# Altium integrated library LIB1.IntLib: 106 symbols (part 1 of 3)
Pins are listed as number, name and electrical type; pins without a type are passive.

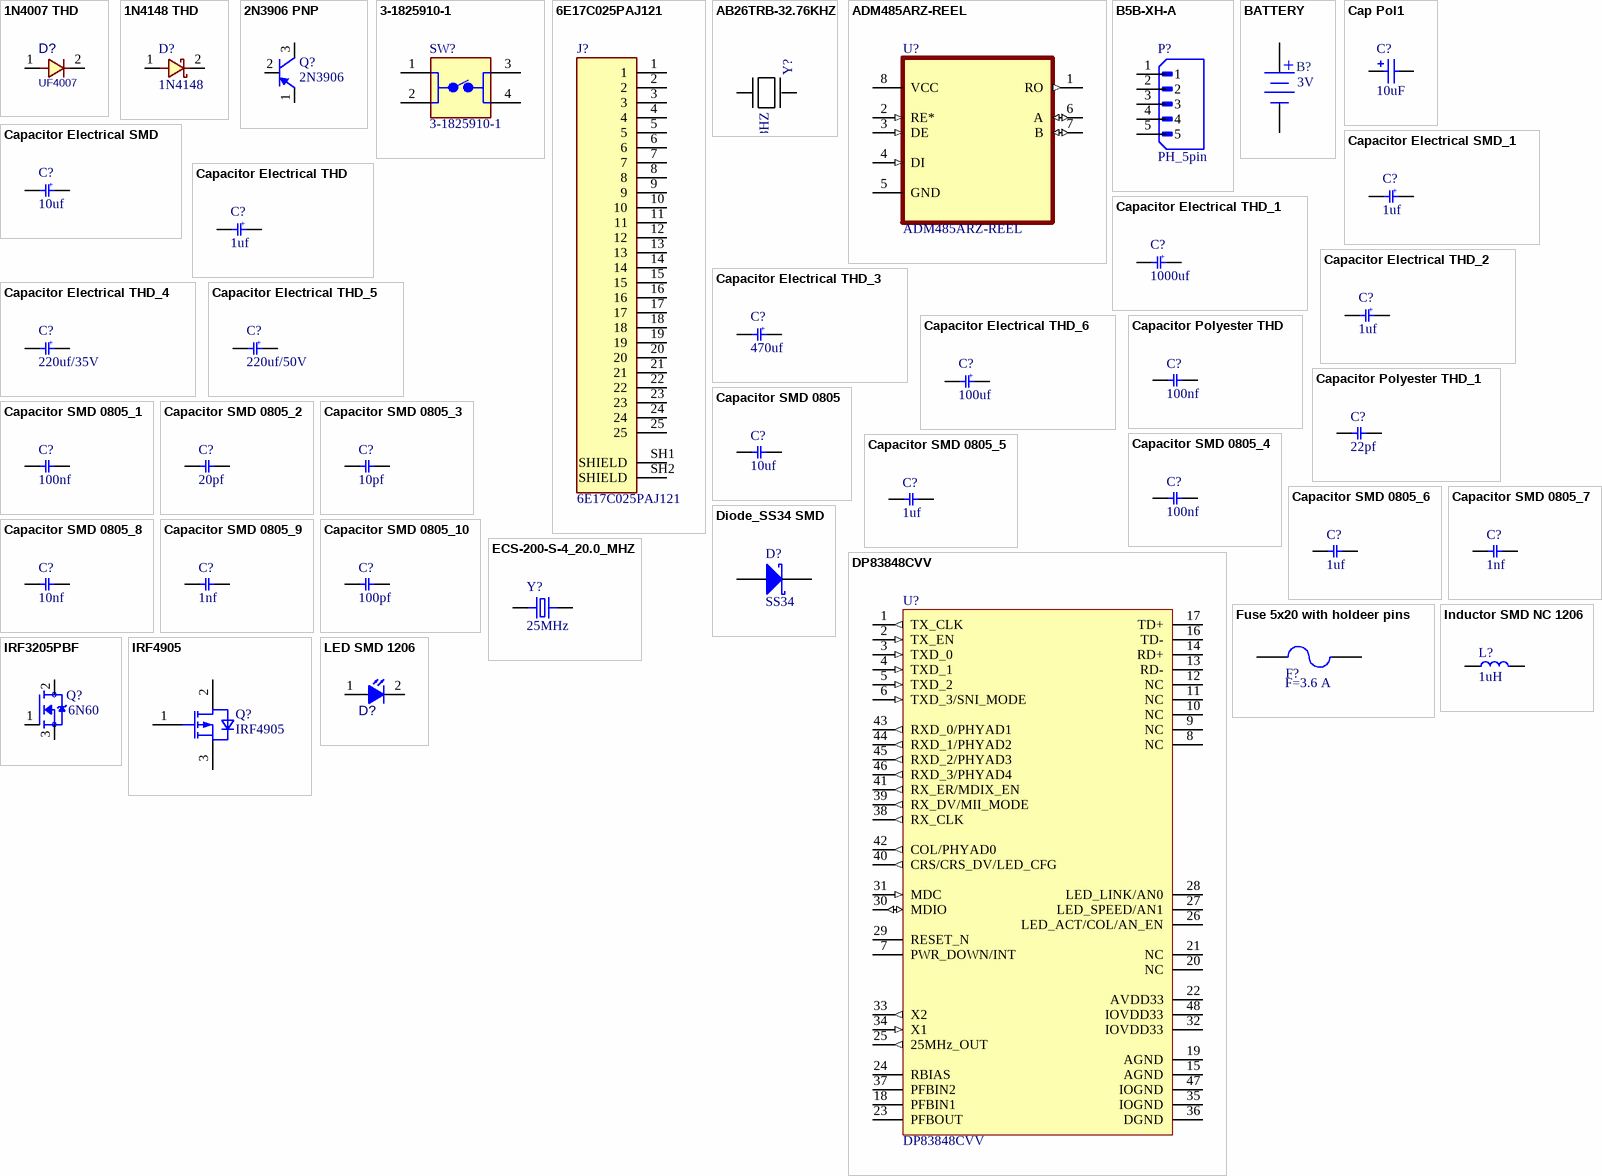
[diagram p0: symbols 1N4007 THD to LED SMD 1206]

## 1N4007 THD
designator D?  value UF4007  (hidden comment: 1N4007 THD)
DIODE, GENERAL PURPOSE, 1000V/1A; DatasheetVersion: 2022; ComponentLink1Description: Tarahiboard; ComponentLink1URL: https://www.tarahiboard.com/product/library-pack
footprint D_AX04_DO41 (DIODE 0.4 INCH SPACING DO-41 (Make www.tarahiboard.com))
footprint D_AX03_1WS (DIODE 0.3 INCH SPACING 1W STAND (Make www.tarahiboard.com))
footprint Diode (Diode, Axial; Body 5.2 x 2.7 mm (LxDia. max), Lead Dia. 0.86 mm (max) (Make www.tarahiboard.com))
footprint Diode-1n4001 ((Make www.tarahiboard.com))
pins: 1, 2

## 1N4148 THD
designator D?  value 1N4148  (hidden comment: 1N4148 THD)
High Conductance Fast Diode; DatasheetVersion: 2022; ComponentLink1Description: Tarahiboard; ComponentLink1URL: https://www.tarahiboard.com/product/library-pack
footprint Diode 1W ((Make www.tarahiboard.com))
footprint Diode 1W_Stand ((Make www.tarahiboard.com))
footprint D_AX02_DO35 (DIODE 0.2 INCH SPACING DO-35, 1N4148 (Make www.tarahiboard.com))
footprint DO-35- (Diode, Axial; Body 3.8 x 1.9 mm (LxDia. max), Lead Dia. 0.53 mm (max) (Make www.tarahiboard.com))
pins: 1, 2

## 2N3906 PNP
designator Q?  value 2N3906  (hidden comment: 2N3906 PNP)
ComponentLink1Description: Tarahiboard; ComponentLink1URL: https://www.tarahiboard.com/product/library-pack; DatasheetVersion: 2022
footprint SOT23_BEC_L (SOT23, 3-Leads, Body 2.9x1.3mm, Pitch 0.95mm, Lead Span 2.4mm, IPC High Density (Make www.tarahiboard.com)); pin to pad 1>2 2>1
footprint TO92 STR ((Make www.tarahiboard.com))
pins: 1 E, 2 B, 3 C

## 3-1825910-1
designator SW?
Switch Push Button OFF (ON) SPST Round Button 0.05A 24VDC Momentary Contact PC Pins Thru-Hole; MF: TE Connectivity; SnapEDA_Link: https://www.snapeda.com/parts/3-1825910-1/TE+Connectivity+ALCOSWITCH+Switches/view-part/?ref=snap; Package: None; Value: *; MP: 3-1825910-1; Check_prices: https://www.snapeda.com/parts/3-1825910-1/TE+Connectivity+ALCOSWITCH+Switches/view-part/?ref=eda
footprint TE_3-1825910-1
pins: 1, 2, 3, 4

## 6E17C025PAJ121
designator J?
Conn D-Subminiature PIN 25 POS 2.76mm Solder RA Thru-Hole 25 Terminal 1 Port; MF: Amphenol; Availability: Warning; Value: *; Package: None; SnapEDA_Link: https://www.snapeda.com/parts/6E17C025PAJ121/Amphenol/view-part/4791916/?ref=snap; Price: None; Check_prices: https://www.snapeda.com/parts/6E17C025PAJ121/Amphenol/view-part/4791916/?ref=eda; MP: 6E17C025PAJ121
footprint CONN_6E17C025PAJ121
pins: 1, 2, 3, 4, 5, 6, 7, 8, 9, 10, 11, 12, 13, 14, 15, 16, 17, 18, 19, 20, 21, 22, 23, 24, 25, SH1 SHIELD, SH2 SHIELD

## AB26TRB-32.76KHZ
designator Y?, comment 32.768HZ
SnapEDA_Link: https://www.snapeda.com/parts/AB26TRB-32.76KHZ/Abracon/view-part/?ref=snap; Check_prices: https://www.snapeda.com/parts/AB26TRB-32.76KHZ/Abracon/view-part/?ref=eda; Value: *
footprint *XTAL_AB26TRB-32.76KHZ
pins: 1, 2

## ADM485ARZ-REEL
designator U?
5 V, Low Power, 5 Mbps, Half Duplex EIA RS-485 Transceiver; MF: Analog Devices; SnapEDA_Link: https://www.snapeda.com/parts/ADM485ARZ/Analog+Devices/view-part/?ref=snap; Package: SOIC-8 Analog Devices; Value: *; MP: ADM485ARZ; Check_prices: https://www.snapeda.com/parts/ADM485ARZ/Analog+Devices/view-part/?ref=eda
footprint SOIC127P600X175-8N
pins: 1 RO (out), 2 RE* (in), 3 DE (in), 4 DI (in), 5 GND, 6 A (io), 7 B (io), 8 VCC (power)

## B5B-XH-A
designator P?, comment PH_5pin
Connector Header Through Hole 5 position 0.098 (2.50mm); MF: JST Sales; MP: B5B-XH-A; SnapEDA_Link: https://www.snapeda.com/parts/B5B-XH-A/JST+Sales+America+Inc./view-part/?ref=snap; Package: None; Value: *; Check_prices: https://www.snapeda.com/parts/B5B-XH-A/JST+Sales+America+Inc./view-part/?ref=eda
footprint JST_B5B-XH-A
pins: 1, 2, 3, 4, 5

## BATTERY
designator B?  value 3V  (hidden comment: BATTERY)
DatasheetVersion: 2022; ComponentLink1Description: Tarahiboard; ComponentLink1URL: https://www.tarahiboard.com/product/library-pack
footprint CELL HOLDER2 (Battery Cell Holder (Make www.tarahiboard.com))
footprint SMD CELL HOLDER ((Make www.tarahiboard.com))
footprint BAT Backup ((Make www.tarahiboard.com))
footprint WA BCMC Battery 1 (Battery Holder, Battery  (www.tarahiboard.com))
footprint WA-BCMC Battery 2 (Battery Holder, Battery (www.tarahiboard.com))
footprint WA-BCMC Battery 3 (Battery Holder, Battery (www.tarahiboard.com))
footprint WA-BCMC Battery 4 (Battery Holder, Battery (www.tarahiboard.com))
footprint WA BCPH 1 (Battery Holder (Make www.tarahiboard.com))
footprint WA BCPH 2 (Battery Holder (Make www.tarahiboard.com))
footprint WA BCPH 3 (Battery Holder (Make www.tarahiboard.com))
footprint WA BCPH 4 (Battery Holder (Make www.tarahiboard.com))
footprint Holder & Battery (Holder Battery 3.3v (Make www.tarahiboard.com))
footprint BATTERY REDD (CELL BATTERY HOLDER 1220 12mm CR1220(Make www.tarahiboard.com))
footprint WA BCPH 2 (Battery Holder (Make www.tarahiboard.com))
pins: 1 + (power), 2 - (power)
1 alternate drawing of the same symbol

## Cap Pol1
designator C?, comment 10uF
Polarized Capacitor (Radial); Published: 8-Jun-2000; Revision: July-2002: Re-released for DXP Platform.; Publisher: Altium Limited; Value: 10uF
simulation model CAP (Capacitor)
signal-integrity model C200M
footprint 3528 (Footprint not found)
footprint TAN-B
footprint cap10
pins: 1, 2

## Capacitor Electrical SMD
designator C?  value 10uf  (hidden comment: Capacitor Electrical SMD)
DatasheetVersion: 2022; ComponentLink1Description: Tarahiboard; ComponentLink1URL: https://www.tarahiboard.com
footprint Elko A ((Make www.tarahiboard.com))
footprint Elko B ((Make www.tarahiboard.com))
footprint Elko C ((Make www.tarahiboard.com))
footprint Elko D ((Make www.tarahiboard.com))
footprint Elko D8 ((Make www.tarahiboard.com))
footprint Elko E ((Make www.tarahiboard.com))
footprint Elko F ((Make www.tarahiboard.com))
footprint Elko G ((Make www.tarahiboard.com))
footprint C_EL_10_9 (Electrolytic Cap, 10.3mm, L: 8.7mm)
footprint C_EL_10_10 (Electrolytic Cap, 10.3mm, L: 10mm)
footprint C_EL_10_12 (Electrolytic Cap, 10.3mm, L: 12.4mm)
footprint C_EL_12 (Electrolytic Cap, 12.5x13mm)
footprint C_EL_6_4 (Electrolytic Cap, D: 6.3mm L: 3.9mm, Size D (Make www.tarahiboard.com))
footprint C_EL_6_6 (Electrolytic Cap, D: 6.3mm L: 5.8mm, Size D (Make www.tarahiboard.com))
footprint C_EL_6_8 (Electrolytic Cap, D: 6.3mm L: 7.7mm, Size D (Make www.tarahiboard.com))
footprint C_EL_8 (Electrolytic Cap, Size E, Size F, 8.3X10 (Make www.tarahiboard.com))
footprint C_EL_4_4 (Electrolytic Cap, D: 4.3mm, Size B, 3.9mm Height)
footprint C_EL_4_5 (Electrolytic Cap, D: 4.3mm, Size B, 5.5mm Height)
footprint C0805 (CHIP Capacitor, 2.0X1.3mm, 0805 (Make www.tarahiboard.com))
pins: 1, 2
text: +

## Capacitor Electrical SMD_1
designator C?, comment value 1uf  (hidden comment: Capacitor Electrical SMD)
DatasheetVersion: 2022; ComponentLink1Description: Tarahiboard; ComponentLink1URL: https://www.tarahiboard.com
footprint Elko A ((Make www.tarahiboard.com))
footprint Elko B ((Make www.tarahiboard.com))
footprint Elko C ((Make www.tarahiboard.com))
footprint Elko D ((Make www.tarahiboard.com))
footprint Elko D8 ((Make www.tarahiboard.com))
footprint Elko E ((Make www.tarahiboard.com))
footprint Elko F ((Make www.tarahiboard.com))
footprint Elko G ((Make www.tarahiboard.com))
footprint C_EL_10_9 (Electrolytic Cap, 10.3mm, L: 8.7mm)
footprint C_EL_10_10 (Electrolytic Cap, 10.3mm, L: 10mm)
footprint C_EL_10_12 (Electrolytic Cap, 10.3mm, L: 12.4mm)
footprint C_EL_12 (Electrolytic Cap, 12.5x13mm)
footprint C_EL_6_4 (Electrolytic Cap, D: 6.3mm L: 3.9mm, Size D (Make www.tarahiboard.com))
footprint C_EL_6_6 (Electrolytic Cap, D: 6.3mm L: 5.8mm, Size D (Make www.tarahiboard.com))
footprint C_EL_6_8 (Electrolytic Cap, D: 6.3mm L: 7.7mm, Size D (Make www.tarahiboard.com))
footprint C_EL_8 (Electrolytic Cap, Size E, Size F, 8.3X10 (Make www.tarahiboard.com))
footprint C_EL_4_4 (Electrolytic Cap, D: 4.3mm, Size B, 3.9mm Height)
footprint C0805 (CHIP Capacitor, 2.0X1.3mm, 0805 (Make www.tarahiboard.com))
footprint C_EL_5 (Electrolytic Cap, D: 5.0mm, L: 5.8mm, Size C)
pins: 1, 2
text: +

## Capacitor Electrical THD
designator C?  value 1uf  (hidden comment: Capacitor Electrical THD)
DatasheetVersion: 20222; ComponentLink1Description: Tarahiboard; ComponentLink1URL: https://www.tarahiboard.com
footprint 1500uF 35V 13x40 ((Make www.tarahiboard.com))
footprint Cap electrolitic radial 8x12-3.5 (Cap electrolitic radial 8x12-3.5 (Make www.tarahiboard.com))
footprint Cap electrolitic radial 10x16-5 (Cap electrolitic radial 10x16-5 (Make www.tarahiboard.com))
footprint Cap electrolitic radial 13x25-5 (Cap electrolitic radial 13x25-5 (Make www.tarahiboard.com))
footprint CAPCITOR ((Make www.tarahiboard.com))
footprint Cap_1_(1.5mm) (Capacitor, Electrolytic, Radial; Body 5 x 6.8 mm (Dia.xH typ); Pin Spacing 2 mm (typ) (Make www.tarahiboard.com))
footprint Cap_2_(2.5mm) (Capacitor, Electrolytic, Radial; Body 6.3 x 6.8 mm (Dia.xH typ); Pin Spacing 2.5 mm (typ)  (Make www.tarahiboard.com))
footprint Cap_3_(3.5mm) (Capacitor, Electrolytic, Radial; Body 8 x 5 mm (Dia.xH typ); Pin Spacing 3.5 mm (typ) (Make www.tarahiboard.com))
footprint Cap_4_(5mm) (Capacitor, Electrolytic, Radial; Body 10 x 5 mm (Dia.xH typ); Pin Spacing 5 mm (typ) (Make www.tarahiboard.com))
footprint Cap1_(2mm) (Capacitor, Electrolytic, Radial; Body 5 x 6.8 mm (Dia.xH typ); Pin Spacing 2 mm (typ) (Make www.tarahiboard.com))
footprint Cap2_(2.5mm) (Capacitor, Electrolytic, Radial; Body 6.3 x 6.8 mm (Dia.xH typ); Pin Spacing 2.5 mm (typ) (Make www.tarahiboard.com))
footprint Cap3_(3.5mm) (Capacitor, Electrolytic, Radial; Body 8 x 5 mm (Dia.xH typ); Pin Spacing 3.5 mm (typ) (Make www.tarahiboard.com))
footprint Cap4_(5mm) (Capacitor, Electrolytic, Radial; Body 10 x 5 mm (Dia.xH typ); Pin Spacing 5 mm (typ) (Make www.tarahiboard.com))
footprint Cap5_(7.5mm) (Capacitor, Electrolytic, Radial; Body 16 x 25 mm (Dia.xH typ); Pin Spacing 7.5 mm (typ) (Make www.tarahiboard.com))
footprint C_EL_4X7 (Cap Elec, D4.0X7.0H pitch: 1.5mm (Make www.tarahiboard.com))
footprint C_EL_5X7 (Cap Elec, D5.0X7.0H pitch: 2mm (Make www.tarahiboard.com))
footprint C_EL_5X11 (Cap Elec, D5.0X11.0H pitch: 2mm (Make www.tarahiboard.com))
footprint C_EL_6X11 (Cap Elec, D6.3X11.0H pitch: 2.5mm (Make www.tarahiboard.com))
footprint C_EL_6X12_R (Cap Elec, D6.3X12.0H pitch: 2.5mm (Make www.tarahiboard.com))
footprint C_EL_8X12 (Cap Elec, D8.0X12.0H pitch: 3.5mm, RB.14/.26, RB.15/.32 (Make www.tarahiboard.com))
footprint C_EL_8X12R (Cap Elec, D8.0X12.0H pitch: 3.5mm, RIGHT ANGLE (Make www.tarahiboard.com))
footprint C_EL_10X12 (Cap Elec, D10.0X12.0H pitch: 5.0mm (Make www.tarahiboard.com))
footprint C_EL_10X20 (Cap Elec, D10.0X20.0H pitch: 5.0mm, RB.2/.4 (Make www.tarahiboard.com))
footprint C_EL_12X25 (Cap Elec, D12.0X25.0H pitch: 5.0mm, RB.2/.5 (Make www.tarahiboard.com))
footprint C_EL_16X25 (Cap Elec, D16.0X25.0H pitch: 7.6mm, RB.3/.6 (Make www.tarahiboard.com))
footprint C_EL_18X35 (Cap Elec, D18.0X35.0H pitch: 7.6mm, RB.3/.7 (Make www.tarahiboard.com))
footprint C_EL_20X35 (Cap Elec, D20.0X35.0H pitch: 10.0mm, RB.4/.8 (Make www.tarahiboard.com))
footprint C_EL_25X40 (Cap Elec, D25.0X40.0H pitch: 12.8mm, RB.5/1 (Make www.tarahiboard.com))
footprint C_EL_26X13X27 (Cap Elec, 26X13X27mm, 18mm pitch (Make www.tarahiboard.com))
footprint C_EL_30X50 (Cap Elec, D30.0X50.0H pitch: 10.0mm (Make www.tarahiboard.com))
footprint C_EL_35X30 (Cap Elec, D35.0X30.0H pitch: 10.0mm, 470uF/400V, RB.44/1.3  (Make www.tarahiboard.com))
footprint PLOAR 30x22.2 ((Make www.tarahiboard.com))
footprint ploar 8x12 size ((Make www.tarahiboard.com))
footprint POLAR 10X20 SIZE ((Make www.tarahiboard.com))
footprint POLAR 16X32 SIZE ((Make www.tarahiboard.com))
pins: 1, 2
text: +

## Capacitor Electrical THD_1
designator C?, comment value 1000uf  (hidden comment: Capacitor Electrical THD)
DatasheetVersion: 20222; ComponentLink1Description: Tarahiboard; ComponentLink1URL: https://www.tarahiboard.com
footprint 1500uF 35V 13x40 ((Make www.tarahiboard.com))
footprint Cap electrolitic radial 8x12-3.5 (Cap electrolitic radial 8x12-3.5 (Make www.tarahiboard.com))
footprint Cap electrolitic radial 10x16-5 (Cap electrolitic radial 10x16-5 (Make www.tarahiboard.com))
footprint Cap electrolitic radial 13x25-5 (Cap electrolitic radial 13x25-5 (Make www.tarahiboard.com))
footprint CAPCITOR ((Make www.tarahiboard.com))
footprint Cap_1_(1.5mm) (Capacitor, Electrolytic, Radial; Body 5 x 6.8 mm (Dia.xH typ); Pin Spacing 2 mm (typ) (Make www.tarahiboard.com))
footprint Cap_2_(2.5mm) (Capacitor, Electrolytic, Radial; Body 6.3 x 6.8 mm (Dia.xH typ); Pin Spacing 2.5 mm (typ)  (Make www.tarahiboard.com))
footprint Cap_3_(3.5mm) (Capacitor, Electrolytic, Radial; Body 8 x 5 mm (Dia.xH typ); Pin Spacing 3.5 mm (typ) (Make www.tarahiboard.com))
footprint Cap_4_(5mm) (Capacitor, Electrolytic, Radial; Body 10 x 5 mm (Dia.xH typ); Pin Spacing 5 mm (typ) (Make www.tarahiboard.com))
footprint Cap1_(2mm) (Capacitor, Electrolytic, Radial; Body 5 x 6.8 mm (Dia.xH typ); Pin Spacing 2 mm (typ) (Make www.tarahiboard.com))
footprint Cap2_(2.5mm) (Capacitor, Electrolytic, Radial; Body 6.3 x 6.8 mm (Dia.xH typ); Pin Spacing 2.5 mm (typ) (Make www.tarahiboard.com))
footprint Cap3_(3.5mm) (Capacitor, Electrolytic, Radial; Body 8 x 5 mm (Dia.xH typ); Pin Spacing 3.5 mm (typ) (Make www.tarahiboard.com))
footprint Cap4_(5mm) (Capacitor, Electrolytic, Radial; Body 10 x 5 mm (Dia.xH typ); Pin Spacing 5 mm (typ) (Make www.tarahiboard.com))
footprint Cap5_(7.5mm) (Capacitor, Electrolytic, Radial; Body 16 x 25 mm (Dia.xH typ); Pin Spacing 7.5 mm (typ) (Make www.tarahiboard.com))
footprint C_EL_4X7 (Cap Elec, D4.0X7.0H pitch: 1.5mm (Make www.tarahiboard.com))
footprint C_EL_5X7 (Cap Elec, D5.0X7.0H pitch: 2mm (Make www.tarahiboard.com))
footprint C_EL_5X11 (Cap Elec, D5.0X11.0H pitch: 2mm (Make www.tarahiboard.com))
footprint C_EL_6X11 (Cap Elec, D6.3X11.0H pitch: 2.5mm (Make www.tarahiboard.com))
footprint C_EL_6X12_R (Cap Elec, D6.3X12.0H pitch: 2.5mm (Make www.tarahiboard.com))
footprint C_EL_8X12 (Cap Elec, D8.0X12.0H pitch: 3.5mm, RB.14/.26, RB.15/.32 (Make www.tarahiboard.com))
footprint C_EL_8X12R (Cap Elec, D8.0X12.0H pitch: 3.5mm, RIGHT ANGLE (Make www.tarahiboard.com))
footprint C_EL_10X12 (Cap Elec, D10.0X12.0H pitch: 5.0mm (Make www.tarahiboard.com))
footprint C_EL_10X20 (Cap Elec, D10.0X20.0H pitch: 5.0mm, RB.2/.4 (Make www.tarahiboard.com))
footprint C_EL_12X25 (Cap Elec, D12.0X25.0H pitch: 5.0mm, RB.2/.5 (Make www.tarahiboard.com))
footprint C_EL_16X25 (Cap Elec, D16.0X25.0H pitch: 7.6mm, RB.3/.6 (Make www.tarahiboard.com))
footprint C_EL_18X35 (Cap Elec, D18.0X35.0H pitch: 7.6mm, RB.3/.7 (Make www.tarahiboard.com))
footprint C_EL_20X35 (Cap Elec, D20.0X35.0H pitch: 10.0mm, RB.4/.8 (Make www.tarahiboard.com))
footprint C_EL_25X40 (Cap Elec, D25.0X40.0H pitch: 12.8mm, RB.5/1 (Make www.tarahiboard.com))
footprint C_EL_26X13X27 (Cap Elec, 26X13X27mm, 18mm pitch (Make www.tarahiboard.com))
footprint C_EL_30X50 (Cap Elec, D30.0X50.0H pitch: 10.0mm (Make www.tarahiboard.com))
footprint C_EL_35X30 (Cap Elec, D35.0X30.0H pitch: 10.0mm, 470uF/400V, RB.44/1.3  (Make www.tarahiboard.com))
footprint PLOAR 30x22.2 ((Make www.tarahiboard.com))
footprint ploar 8x12 size ((Make www.tarahiboard.com))
footprint POLAR 10X20 SIZE ((Make www.tarahiboard.com))
footprint POLAR 16X32 SIZE ((Make www.tarahiboard.com))
pins: 1, 2
text: +

## Capacitor Electrical THD_2
designator C?, comment value 1uf  (hidden comment: Capacitor Electrical THD)
DatasheetVersion: 20222; ComponentLink1Description: Tarahiboard; ComponentLink1URL: https://www.tarahiboard.com
footprint 1500uF 35V 13x40 ((Make www.tarahiboard.com))
footprint Cap electrolitic radial 8x12-3.5 (Cap electrolitic radial 8x12-3.5 (Make www.tarahiboard.com))
footprint Cap electrolitic radial 10x16-5 (Cap electrolitic radial 10x16-5 (Make www.tarahiboard.com))
footprint Cap electrolitic radial 13x25-5 (Cap electrolitic radial 13x25-5 (Make www.tarahiboard.com))
footprint CAPCITOR ((Make www.tarahiboard.com))
footprint Cap_1_(1.5mm) (Capacitor, Electrolytic, Radial; Body 5 x 6.8 mm (Dia.xH typ); Pin Spacing 2 mm (typ) (Make www.tarahiboard.com))
footprint Cap_2_(2.5mm) (Capacitor, Electrolytic, Radial; Body 6.3 x 6.8 mm (Dia.xH typ); Pin Spacing 2.5 mm (typ)  (Make www.tarahiboard.com))
footprint Cap_3_(3.5mm) (Capacitor, Electrolytic, Radial; Body 8 x 5 mm (Dia.xH typ); Pin Spacing 3.5 mm (typ) (Make www.tarahiboard.com))
footprint Cap_4_(5mm) (Capacitor, Electrolytic, Radial; Body 10 x 5 mm (Dia.xH typ); Pin Spacing 5 mm (typ) (Make www.tarahiboard.com))
footprint Cap1_(2mm) (Capacitor, Electrolytic, Radial; Body 5 x 6.8 mm (Dia.xH typ); Pin Spacing 2 mm (typ) (Make www.tarahiboard.com))
footprint Cap2_(2.5mm) (Capacitor, Electrolytic, Radial; Body 6.3 x 6.8 mm (Dia.xH typ); Pin Spacing 2.5 mm (typ) (Make www.tarahiboard.com))
footprint Cap3_(3.5mm) (Capacitor, Electrolytic, Radial; Body 8 x 5 mm (Dia.xH typ); Pin Spacing 3.5 mm (typ) (Make www.tarahiboard.com))
footprint Cap4_(5mm) (Capacitor, Electrolytic, Radial; Body 10 x 5 mm (Dia.xH typ); Pin Spacing 5 mm (typ) (Make www.tarahiboard.com))
footprint Cap5_(7.5mm) (Capacitor, Electrolytic, Radial; Body 16 x 25 mm (Dia.xH typ); Pin Spacing 7.5 mm (typ) (Make www.tarahiboard.com))
footprint C_EL_4X7 (Cap Elec, D4.0X7.0H pitch: 1.5mm (Make www.tarahiboard.com))
footprint C_EL_5X7 (Cap Elec, D5.0X7.0H pitch: 2mm (Make www.tarahiboard.com))
footprint C_EL_5X11 (Cap Elec, D5.0X11.0H pitch: 2mm (Make www.tarahiboard.com))
footprint C_EL_6X11 (Cap Elec, D6.3X11.0H pitch: 2.5mm (Make www.tarahiboard.com))
footprint C_EL_6X12_R (Cap Elec, D6.3X12.0H pitch: 2.5mm (Make www.tarahiboard.com))
footprint C_EL_8X12 (Cap Elec, D8.0X12.0H pitch: 3.5mm, RB.14/.26, RB.15/.32 (Make www.tarahiboard.com))
footprint C_EL_8X12R (Cap Elec, D8.0X12.0H pitch: 3.5mm, RIGHT ANGLE (Make www.tarahiboard.com))
footprint C_EL_10X12 (Cap Elec, D10.0X12.0H pitch: 5.0mm (Make www.tarahiboard.com))
footprint C_EL_10X20 (Cap Elec, D10.0X20.0H pitch: 5.0mm, RB.2/.4 (Make www.tarahiboard.com))
footprint C_EL_12X25 (Cap Elec, D12.0X25.0H pitch: 5.0mm, RB.2/.5 (Make www.tarahiboard.com))
footprint C_EL_16X25 (Cap Elec, D16.0X25.0H pitch: 7.6mm, RB.3/.6 (Make www.tarahiboard.com))
footprint C_EL_18X35 (Cap Elec, D18.0X35.0H pitch: 7.6mm, RB.3/.7 (Make www.tarahiboard.com))
footprint C_EL_20X35 (Cap Elec, D20.0X35.0H pitch: 10.0mm, RB.4/.8 (Make www.tarahiboard.com))
footprint C_EL_25X40 (Cap Elec, D25.0X40.0H pitch: 12.8mm, RB.5/1 (Make www.tarahiboard.com))
footprint C_EL_26X13X27 (Cap Elec, 26X13X27mm, 18mm pitch (Make www.tarahiboard.com))
footprint C_EL_30X50 (Cap Elec, D30.0X50.0H pitch: 10.0mm (Make www.tarahiboard.com))
footprint C_EL_35X30 (Cap Elec, D35.0X30.0H pitch: 10.0mm, 470uF/400V, RB.44/1.3  (Make www.tarahiboard.com))
footprint PLOAR 30x22.2 ((Make www.tarahiboard.com))
footprint ploar 8x12 size ((Make www.tarahiboard.com))
footprint POLAR 10X20 SIZE ((Make www.tarahiboard.com))
footprint POLAR 16X32 SIZE ((Make www.tarahiboard.com))
pins: 1, 2
text: +

## Capacitor Electrical THD_3
designator C?, comment value 470uf  (hidden comment: Capacitor Electrical THD)
DatasheetVersion: 20222; ComponentLink1Description: Tarahiboard; ComponentLink1URL: https://www.tarahiboard.com
footprint 1500uF 35V 13x40 ((Make www.tarahiboard.com))
footprint Cap electrolitic radial 8x12-3.5 (Cap electrolitic radial 8x12-3.5 (Make www.tarahiboard.com))
footprint Cap electrolitic radial 10x16-5 (Cap electrolitic radial 10x16-5 (Make www.tarahiboard.com))
footprint Cap electrolitic radial 13x25-5 (Cap electrolitic radial 13x25-5 (Make www.tarahiboard.com))
footprint CAPCITOR ((Make www.tarahiboard.com))
footprint Cap_1_(1.5mm) (Capacitor, Electrolytic, Radial; Body 5 x 6.8 mm (Dia.xH typ); Pin Spacing 2 mm (typ) (Make www.tarahiboard.com))
footprint Cap_2_(2.5mm) (Capacitor, Electrolytic, Radial; Body 6.3 x 6.8 mm (Dia.xH typ); Pin Spacing 2.5 mm (typ)  (Make www.tarahiboard.com))
footprint Cap_3_(3.5mm) (Capacitor, Electrolytic, Radial; Body 8 x 5 mm (Dia.xH typ); Pin Spacing 3.5 mm (typ) (Make www.tarahiboard.com))
footprint Cap_4_(5mm) (Capacitor, Electrolytic, Radial; Body 10 x 5 mm (Dia.xH typ); Pin Spacing 5 mm (typ) (Make www.tarahiboard.com))
footprint Cap1_(2mm) (Capacitor, Electrolytic, Radial; Body 5 x 6.8 mm (Dia.xH typ); Pin Spacing 2 mm (typ) (Make www.tarahiboard.com))
footprint Cap2_(2.5mm) (Capacitor, Electrolytic, Radial; Body 6.3 x 6.8 mm (Dia.xH typ); Pin Spacing 2.5 mm (typ) (Make www.tarahiboard.com))
footprint Cap3_(3.5mm) (Capacitor, Electrolytic, Radial; Body 8 x 5 mm (Dia.xH typ); Pin Spacing 3.5 mm (typ) (Make www.tarahiboard.com))
footprint Cap4_(5mm) (Capacitor, Electrolytic, Radial; Body 10 x 5 mm (Dia.xH typ); Pin Spacing 5 mm (typ) (Make www.tarahiboard.com))
footprint Cap5_(7.5mm) (Capacitor, Electrolytic, Radial; Body 16 x 25 mm (Dia.xH typ); Pin Spacing 7.5 mm (typ) (Make www.tarahiboard.com))
footprint C_EL_4X7 (Cap Elec, D4.0X7.0H pitch: 1.5mm (Make www.tarahiboard.com))
footprint C_EL_5X7 (Cap Elec, D5.0X7.0H pitch: 2mm (Make www.tarahiboard.com))
footprint C_EL_5X11 (Cap Elec, D5.0X11.0H pitch: 2mm (Make www.tarahiboard.com))
footprint C_EL_6X11 (Cap Elec, D6.3X11.0H pitch: 2.5mm (Make www.tarahiboard.com))
footprint C_EL_6X12_R (Cap Elec, D6.3X12.0H pitch: 2.5mm (Make www.tarahiboard.com))
footprint C_EL_8X12 (Cap Elec, D8.0X12.0H pitch: 3.5mm, RB.14/.26, RB.15/.32 (Make www.tarahiboard.com))
footprint C_EL_8X12R (Cap Elec, D8.0X12.0H pitch: 3.5mm, RIGHT ANGLE (Make www.tarahiboard.com))
footprint C_EL_10X12 (Cap Elec, D10.0X12.0H pitch: 5.0mm (Make www.tarahiboard.com))
footprint C_EL_10X20 (Cap Elec, D10.0X20.0H pitch: 5.0mm, RB.2/.4 (Make www.tarahiboard.com))
footprint C_EL_12X25 (Cap Elec, D12.0X25.0H pitch: 5.0mm, RB.2/.5 (Make www.tarahiboard.com))
footprint C_EL_16X25 (Cap Elec, D16.0X25.0H pitch: 7.6mm, RB.3/.6 (Make www.tarahiboard.com))
footprint C_EL_18X35 (Cap Elec, D18.0X35.0H pitch: 7.6mm, RB.3/.7 (Make www.tarahiboard.com))
footprint C_EL_20X35 (Cap Elec, D20.0X35.0H pitch: 10.0mm, RB.4/.8 (Make www.tarahiboard.com))
footprint C_EL_25X40 (Cap Elec, D25.0X40.0H pitch: 12.8mm, RB.5/1 (Make www.tarahiboard.com))
footprint C_EL_26X13X27 (Cap Elec, 26X13X27mm, 18mm pitch (Make www.tarahiboard.com))
footprint C_EL_30X50 (Cap Elec, D30.0X50.0H pitch: 10.0mm (Make www.tarahiboard.com))
footprint C_EL_35X30 (Cap Elec, D35.0X30.0H pitch: 10.0mm, 470uF/400V, RB.44/1.3  (Make www.tarahiboard.com))
footprint PLOAR 30x22.2 ((Make www.tarahiboard.com))
footprint ploar 8x12 size ((Make www.tarahiboard.com))
footprint POLAR 10X20 SIZE ((Make www.tarahiboard.com))
footprint POLAR 16X32 SIZE ((Make www.tarahiboard.com))
pins: 1, 2
text: +

## Capacitor Electrical THD_4
designator C?, comment value 220uf/35V  (hidden comment: Capacitor Electrical THD)
DatasheetVersion: 20222; ComponentLink1Description: Tarahiboard; ComponentLink1URL: https://www.tarahiboard.com
footprint 1500uF 35V 13x40 ((Make www.tarahiboard.com))
footprint Cap electrolitic radial 8x12-3.5 (Cap electrolitic radial 8x12-3.5 (Make www.tarahiboard.com))
footprint Cap electrolitic radial 10x16-5 (Cap electrolitic radial 10x16-5 (Make www.tarahiboard.com))
footprint Cap electrolitic radial 13x25-5 (Cap electrolitic radial 13x25-5 (Make www.tarahiboard.com))
footprint CAPCITOR ((Make www.tarahiboard.com))
footprint Cap_1_(1.5mm) (Capacitor, Electrolytic, Radial; Body 5 x 6.8 mm (Dia.xH typ); Pin Spacing 2 mm (typ) (Make www.tarahiboard.com))
footprint Cap_2_(2.5mm) (Capacitor, Electrolytic, Radial; Body 6.3 x 6.8 mm (Dia.xH typ); Pin Spacing 2.5 mm (typ)  (Make www.tarahiboard.com))
footprint Cap_3_(3.5mm) (Capacitor, Electrolytic, Radial; Body 8 x 5 mm (Dia.xH typ); Pin Spacing 3.5 mm (typ) (Make www.tarahiboard.com))
footprint Cap_4_(5mm) (Capacitor, Electrolytic, Radial; Body 10 x 5 mm (Dia.xH typ); Pin Spacing 5 mm (typ) (Make www.tarahiboard.com))
footprint Cap1_(2mm) (Capacitor, Electrolytic, Radial; Body 5 x 6.8 mm (Dia.xH typ); Pin Spacing 2 mm (typ) (Make www.tarahiboard.com))
footprint Cap2_(2.5mm) (Capacitor, Electrolytic, Radial; Body 6.3 x 6.8 mm (Dia.xH typ); Pin Spacing 2.5 mm (typ) (Make www.tarahiboard.com))
footprint Cap3_(3.5mm) (Capacitor, Electrolytic, Radial; Body 8 x 5 mm (Dia.xH typ); Pin Spacing 3.5 mm (typ) (Make www.tarahiboard.com))
footprint Cap4_(5mm) (Capacitor, Electrolytic, Radial; Body 10 x 5 mm (Dia.xH typ); Pin Spacing 5 mm (typ) (Make www.tarahiboard.com))
footprint Cap5_(7.5mm) (Capacitor, Electrolytic, Radial; Body 16 x 25 mm (Dia.xH typ); Pin Spacing 7.5 mm (typ) (Make www.tarahiboard.com))
footprint C_EL_4X7 (Cap Elec, D4.0X7.0H pitch: 1.5mm (Make www.tarahiboard.com))
footprint C_EL_5X7 (Cap Elec, D5.0X7.0H pitch: 2mm (Make www.tarahiboard.com))
footprint C_EL_5X11 (Cap Elec, D5.0X11.0H pitch: 2mm (Make www.tarahiboard.com))
footprint C_EL_6X11 (Cap Elec, D6.3X11.0H pitch: 2.5mm (Make www.tarahiboard.com))
footprint C_EL_6X12_R (Cap Elec, D6.3X12.0H pitch: 2.5mm (Make www.tarahiboard.com))
footprint C_EL_8X12 (Cap Elec, D8.0X12.0H pitch: 3.5mm, RB.14/.26, RB.15/.32 (Make www.tarahiboard.com))
footprint C_EL_8X12R (Cap Elec, D8.0X12.0H pitch: 3.5mm, RIGHT ANGLE (Make www.tarahiboard.com))
footprint C_EL_10X12 (Cap Elec, D10.0X12.0H pitch: 5.0mm (Make www.tarahiboard.com))
footprint C_EL_10X20 (Cap Elec, D10.0X20.0H pitch: 5.0mm, RB.2/.4 (Make www.tarahiboard.com))
footprint C_EL_12X25 (Cap Elec, D12.0X25.0H pitch: 5.0mm, RB.2/.5 (Make www.tarahiboard.com))
footprint C_EL_16X25 (Cap Elec, D16.0X25.0H pitch: 7.6mm, RB.3/.6 (Make www.tarahiboard.com))
footprint C_EL_18X35 (Cap Elec, D18.0X35.0H pitch: 7.6mm, RB.3/.7 (Make www.tarahiboard.com))
footprint C_EL_20X35 (Cap Elec, D20.0X35.0H pitch: 10.0mm, RB.4/.8 (Make www.tarahiboard.com))
footprint C_EL_25X40 (Cap Elec, D25.0X40.0H pitch: 12.8mm, RB.5/1 (Make www.tarahiboard.com))
footprint C_EL_26X13X27 (Cap Elec, 26X13X27mm, 18mm pitch (Make www.tarahiboard.com))
footprint C_EL_30X50 (Cap Elec, D30.0X50.0H pitch: 10.0mm (Make www.tarahiboard.com))
footprint C_EL_35X30 (Cap Elec, D35.0X30.0H pitch: 10.0mm, 470uF/400V, RB.44/1.3  (Make www.tarahiboard.com))
footprint PLOAR 30x22.2 ((Make www.tarahiboard.com))
footprint ploar 8x12 size ((Make www.tarahiboard.com))
footprint POLAR 10X20 SIZE ((Make www.tarahiboard.com))
footprint POLAR 16X32 SIZE ((Make www.tarahiboard.com))
pins: 1, 2
text: +

## Capacitor Electrical THD_5
designator C?, comment value 220uf/50V  (hidden comment: Capacitor Electrical THD)
DatasheetVersion: 20222; ComponentLink1Description: Tarahiboard; ComponentLink1URL: https://www.tarahiboard.com
footprint 1500uF 35V 13x40 ((Make www.tarahiboard.com))
footprint Cap electrolitic radial 8x12-3.5 (Cap electrolitic radial 8x12-3.5 (Make www.tarahiboard.com))
footprint Cap electrolitic radial 10x16-5 (Cap electrolitic radial 10x16-5 (Make www.tarahiboard.com))
footprint Cap electrolitic radial 13x25-5 (Cap electrolitic radial 13x25-5 (Make www.tarahiboard.com))
footprint CAPCITOR ((Make www.tarahiboard.com))
footprint Cap_1_(1.5mm) (Capacitor, Electrolytic, Radial; Body 5 x 6.8 mm (Dia.xH typ); Pin Spacing 2 mm (typ) (Make www.tarahiboard.com))
footprint Cap_2_(2.5mm) (Capacitor, Electrolytic, Radial; Body 6.3 x 6.8 mm (Dia.xH typ); Pin Spacing 2.5 mm (typ)  (Make www.tarahiboard.com))
footprint Cap_3_(3.5mm) (Capacitor, Electrolytic, Radial; Body 8 x 5 mm (Dia.xH typ); Pin Spacing 3.5 mm (typ) (Make www.tarahiboard.com))
footprint Cap_4_(5mm) (Capacitor, Electrolytic, Radial; Body 10 x 5 mm (Dia.xH typ); Pin Spacing 5 mm (typ) (Make www.tarahiboard.com))
footprint Cap1_(2mm) (Capacitor, Electrolytic, Radial; Body 5 x 6.8 mm (Dia.xH typ); Pin Spacing 2 mm (typ) (Make www.tarahiboard.com))
footprint Cap2_(2.5mm) (Capacitor, Electrolytic, Radial; Body 6.3 x 6.8 mm (Dia.xH typ); Pin Spacing 2.5 mm (typ) (Make www.tarahiboard.com))
footprint Cap3_(3.5mm) (Capacitor, Electrolytic, Radial; Body 8 x 5 mm (Dia.xH typ); Pin Spacing 3.5 mm (typ) (Make www.tarahiboard.com))
footprint Cap4_(5mm) (Capacitor, Electrolytic, Radial; Body 10 x 5 mm (Dia.xH typ); Pin Spacing 5 mm (typ) (Make www.tarahiboard.com))
footprint Cap5_(7.5mm) (Capacitor, Electrolytic, Radial; Body 16 x 25 mm (Dia.xH typ); Pin Spacing 7.5 mm (typ) (Make www.tarahiboard.com))
footprint C_EL_4X7 (Cap Elec, D4.0X7.0H pitch: 1.5mm (Make www.tarahiboard.com))
footprint C_EL_5X7 (Cap Elec, D5.0X7.0H pitch: 2mm (Make www.tarahiboard.com))
footprint C_EL_5X11 (Cap Elec, D5.0X11.0H pitch: 2mm (Make www.tarahiboard.com))
footprint C_EL_6X11 (Cap Elec, D6.3X11.0H pitch: 2.5mm (Make www.tarahiboard.com))
footprint C_EL_6X12_R (Cap Elec, D6.3X12.0H pitch: 2.5mm (Make www.tarahiboard.com))
footprint C_EL_8X12 (Cap Elec, D8.0X12.0H pitch: 3.5mm, RB.14/.26, RB.15/.32 (Make www.tarahiboard.com))
footprint C_EL_8X12R (Cap Elec, D8.0X12.0H pitch: 3.5mm, RIGHT ANGLE (Make www.tarahiboard.com))
footprint C_EL_10X12 (Cap Elec, D10.0X12.0H pitch: 5.0mm (Make www.tarahiboard.com))
footprint C_EL_10X20 (Cap Elec, D10.0X20.0H pitch: 5.0mm, RB.2/.4 (Make www.tarahiboard.com))
footprint C_EL_12X25 (Cap Elec, D12.0X25.0H pitch: 5.0mm, RB.2/.5 (Make www.tarahiboard.com))
footprint C_EL_16X25 (Cap Elec, D16.0X25.0H pitch: 7.6mm, RB.3/.6 (Make www.tarahiboard.com))
footprint C_EL_18X35 (Cap Elec, D18.0X35.0H pitch: 7.6mm, RB.3/.7 (Make www.tarahiboard.com))
footprint C_EL_20X35 (Cap Elec, D20.0X35.0H pitch: 10.0mm, RB.4/.8 (Make www.tarahiboard.com))
footprint C_EL_25X40 (Cap Elec, D25.0X40.0H pitch: 12.8mm, RB.5/1 (Make www.tarahiboard.com))
footprint C_EL_26X13X27 (Cap Elec, 26X13X27mm, 18mm pitch (Make www.tarahiboard.com))
footprint C_EL_30X50 (Cap Elec, D30.0X50.0H pitch: 10.0mm (Make www.tarahiboard.com))
footprint C_EL_35X30 (Cap Elec, D35.0X30.0H pitch: 10.0mm, 470uF/400V, RB.44/1.3  (Make www.tarahiboard.com))
footprint PLOAR 30x22.2 ((Make www.tarahiboard.com))
footprint ploar 8x12 size ((Make www.tarahiboard.com))
footprint POLAR 10X20 SIZE ((Make www.tarahiboard.com))
footprint POLAR 16X32 SIZE ((Make www.tarahiboard.com))
pins: 1, 2
text: +

## Capacitor Electrical THD_6
designator C?, comment value 100uf  (hidden comment: Capacitor Electrical THD)
DatasheetVersion: 20222; ComponentLink1Description: Tarahiboard; ComponentLink1URL: https://www.tarahiboard.com
footprint 1500uF 35V 13x40 ((Make www.tarahiboard.com))
footprint Cap electrolitic radial 8x12-3.5 (Cap electrolitic radial 8x12-3.5 (Make www.tarahiboard.com))
footprint Cap electrolitic radial 10x16-5 (Cap electrolitic radial 10x16-5 (Make www.tarahiboard.com))
footprint Cap electrolitic radial 13x25-5 (Cap electrolitic radial 13x25-5 (Make www.tarahiboard.com))
footprint CAPCITOR ((Make www.tarahiboard.com))
footprint Cap_1_(1.5mm) (Capacitor, Electrolytic, Radial; Body 5 x 6.8 mm (Dia.xH typ); Pin Spacing 2 mm (typ) (Make www.tarahiboard.com))
footprint Cap_2_(2.5mm) (Capacitor, Electrolytic, Radial; Body 6.3 x 6.8 mm (Dia.xH typ); Pin Spacing 2.5 mm (typ)  (Make www.tarahiboard.com))
footprint Cap_3_(3.5mm) (Capacitor, Electrolytic, Radial; Body 8 x 5 mm (Dia.xH typ); Pin Spacing 3.5 mm (typ) (Make www.tarahiboard.com))
footprint Cap_4_(5mm) (Capacitor, Electrolytic, Radial; Body 10 x 5 mm (Dia.xH typ); Pin Spacing 5 mm (typ) (Make www.tarahiboard.com))
footprint Cap1_(2mm) (Capacitor, Electrolytic, Radial; Body 5 x 6.8 mm (Dia.xH typ); Pin Spacing 2 mm (typ) (Make www.tarahiboard.com))
footprint Cap2_(2.5mm) (Capacitor, Electrolytic, Radial; Body 6.3 x 6.8 mm (Dia.xH typ); Pin Spacing 2.5 mm (typ) (Make www.tarahiboard.com))
footprint Cap3_(3.5mm) (Capacitor, Electrolytic, Radial; Body 8 x 5 mm (Dia.xH typ); Pin Spacing 3.5 mm (typ) (Make www.tarahiboard.com))
footprint Cap4_(5mm) (Capacitor, Electrolytic, Radial; Body 10 x 5 mm (Dia.xH typ); Pin Spacing 5 mm (typ) (Make www.tarahiboard.com))
footprint Cap5_(7.5mm) (Capacitor, Electrolytic, Radial; Body 16 x 25 mm (Dia.xH typ); Pin Spacing 7.5 mm (typ) (Make www.tarahiboard.com))
footprint C_EL_4X7 (Cap Elec, D4.0X7.0H pitch: 1.5mm (Make www.tarahiboard.com))
footprint C_EL_5X7 (Cap Elec, D5.0X7.0H pitch: 2mm (Make www.tarahiboard.com))
footprint C_EL_5X11 (Cap Elec, D5.0X11.0H pitch: 2mm (Make www.tarahiboard.com))
footprint C_EL_6X11 (Cap Elec, D6.3X11.0H pitch: 2.5mm (Make www.tarahiboard.com))
footprint C_EL_6X12_R (Cap Elec, D6.3X12.0H pitch: 2.5mm (Make www.tarahiboard.com))
footprint C_EL_8X12 (Cap Elec, D8.0X12.0H pitch: 3.5mm, RB.14/.26, RB.15/.32 (Make www.tarahiboard.com))
footprint C_EL_8X12R (Cap Elec, D8.0X12.0H pitch: 3.5mm, RIGHT ANGLE (Make www.tarahiboard.com))
footprint C_EL_10X12 (Cap Elec, D10.0X12.0H pitch: 5.0mm (Make www.tarahiboard.com))
footprint C_EL_10X20 (Cap Elec, D10.0X20.0H pitch: 5.0mm, RB.2/.4 (Make www.tarahiboard.com))
footprint C_EL_12X25 (Cap Elec, D12.0X25.0H pitch: 5.0mm, RB.2/.5 (Make www.tarahiboard.com))
footprint C_EL_16X25 (Cap Elec, D16.0X25.0H pitch: 7.6mm, RB.3/.6 (Make www.tarahiboard.com))
footprint C_EL_18X35 (Cap Elec, D18.0X35.0H pitch: 7.6mm, RB.3/.7 (Make www.tarahiboard.com))
footprint C_EL_20X35 (Cap Elec, D20.0X35.0H pitch: 10.0mm, RB.4/.8 (Make www.tarahiboard.com))
footprint C_EL_25X40 (Cap Elec, D25.0X40.0H pitch: 12.8mm, RB.5/1 (Make www.tarahiboard.com))
footprint C_EL_26X13X27 (Cap Elec, 26X13X27mm, 18mm pitch (Make www.tarahiboard.com))
footprint C_EL_30X50 (Cap Elec, D30.0X50.0H pitch: 10.0mm (Make www.tarahiboard.com))
footprint C_EL_35X30 (Cap Elec, D35.0X30.0H pitch: 10.0mm, 470uF/400V, RB.44/1.3  (Make www.tarahiboard.com))
footprint PLOAR 30x22.2 ((Make www.tarahiboard.com))
footprint ploar 8x12 size ((Make www.tarahiboard.com))
footprint POLAR 10X20 SIZE ((Make www.tarahiboard.com))
footprint POLAR 16X32 SIZE ((Make www.tarahiboard.com))
pins: 1, 2
text: +

## Capacitor Polyester THD
designator C?  value 100nf  (hidden comment: Capacitor Polyester THD)
DatasheetVersion: 2022; ComponentLink1Description: Tarahiboard; ComponentLink1URL: https://www.tarahiboard.com
footprint Cap - 10nF - 630V ((Make www.tarahiboard.com))
footprint Cap - 100nF - 2 ((www.smartw.ir))
footprint Cap - 100nF - 400V ((www.smartw.ir))
footprint Cap - 220n - 400V - Poly ((Make www.tarahiboard.com))
footprint Cap - 330nF - 400V ((Make www.tarahiboard.com))
footprint Cap_680nF ((Make www.tarahiboard.com))
footprint C_PLY_6X2_5 (CAP, FILM MKT, 6.3X2.4mm, pitch: 4.7mm (Make www.tarahiboard.com))
footprint C_PLY_6X3 (CAP, POLYESTER, 5.8X3.5mm pitch: 5.0mm (Make www.tarahiboard.com))
footprint C_PLY_7X3 (CAP, POLYESTER, 7.5X3mm pitch: 5.0mm(Make www.tarahiboard.com))
footprint C_PLY_7X5 (CAP, POLYESTER, 7.0X5.0mm pitch: 5.0mm (Make www.tarahiboard.com))
footprint C_PLY_7X5X10 (CAP, POLYESTER, 7.0X5.0x10mm pitch: 5.0mm (Make www.tarahiboard.com))
footprint C_PLY_7X6 (CAP, POLYESTER, 7.0X6.0mm pitch: 5.0mm (Make www.tarahiboard.com))
footprint C_PLY_7X6_5 (CAP, POLYESTER, 7.3X6.5mm pitch: 5.0mm (Make www.tarahiboard.com))
footprint C_PLY_9X6 (CAP, POLYESTER, 9.3X5.2mm pitch: 7.6mm (Make www.tarahiboard.com))
footprint C_PLY_10X5 (CAP, POLYESTER, 10X5.5mm pitch: 7.6mm (Make www.tarahiboard.com))
footprint C_PLY_10X6X9 (CAP, POLYESTER, 10.5X6.0X9.0mm pitch: 7.6mm (Make www.tarahiboard.com))
footprint C_PLY_10X6X12 (CAP, POLYESTER, 10.3X6.0X12.0mm pitch: 7.6mm(Make www.tarahiboard.com))
footprint C_PLY_10X8 (CAP, POLYESTER, 10.0X8.0 pitch: 7.6mm (Make www.tarahiboard.com))
footprint C_PLY_12X4 (CAP, POLYESTER, 12.5X4.5X9.0 pitch: 10mm (Make www.tarahiboard.com))
footprint C_PLY_13X5 (CAP, POLYESTER, 12.8X4.8 pitch: 10mm(Make www.tarahiboard.com))
footprint C_PLY_19X8 (CAP, POLYESTER, 19.0X8.0mm pitch: 15.0mm, 0.22uF 400V (Make www.tarahiboard.com))
footprint C_PLY_22X7 (CAP, POLYESTER, 33.0X7.0mm pitch: 20.0mm, 0.68uF 400V  (Make www.tarahiboard.com))
footprint C_PLY_24X6 (CAP, POLYESTER, 23.8X5.8mm pitch: 20.0mm, 0.33uF 400V (Make www.tarahiboard.com))
footprint C_PLY_26X8 (CAP, POLYESTER, 26.0X7.8mm pitch: 20.0mm, 0.68uF 400V (Make www.tarahiboard.com))
footprint C_PLY_26X9 (CAP, POLYESTER, 26.0X9.3mm pitch: 20.0mm, 0.68uF 400V (Make www.tarahiboard.com))
pins: 1, 2

## Capacitor Polyester THD_1
designator C?, comment value 22pf  (hidden comment: Capacitor Polyester THD)
DatasheetVersion: 2022; ComponentLink1Description: Tarahiboard; ComponentLink1URL: https://www.tarahiboard.com
footprint Cap - 10nF - 630V ((Make www.tarahiboard.com))
footprint Cap - 100nF - 2 ((www.smartw.ir))
footprint Cap - 100nF - 400V ((www.smartw.ir))
footprint Cap - 220n - 400V - Poly ((Make www.tarahiboard.com))
footprint Cap - 330nF - 400V ((Make www.tarahiboard.com))
footprint Cap_680nF ((Make www.tarahiboard.com))
footprint C_PLY_6X2_5 (CAP, FILM MKT, 6.3X2.4mm, pitch: 4.7mm (Make www.tarahiboard.com))
footprint C_PLY_6X3 (CAP, POLYESTER, 5.8X3.5mm pitch: 5.0mm (Make www.tarahiboard.com))
footprint C_PLY_7X3 (CAP, POLYESTER, 7.5X3mm pitch: 5.0mm(Make www.tarahiboard.com))
footprint C_PLY_7X5 (CAP, POLYESTER, 7.0X5.0mm pitch: 5.0mm (Make www.tarahiboard.com))
footprint C_PLY_7X5X10 (CAP, POLYESTER, 7.0X5.0x10mm pitch: 5.0mm (Make www.tarahiboard.com))
footprint C_PLY_7X6 (CAP, POLYESTER, 7.0X6.0mm pitch: 5.0mm (Make www.tarahiboard.com))
footprint C_PLY_7X6_5 (CAP, POLYESTER, 7.3X6.5mm pitch: 5.0mm (Make www.tarahiboard.com))
footprint C_PLY_9X6 (CAP, POLYESTER, 9.3X5.2mm pitch: 7.6mm (Make www.tarahiboard.com))
footprint C_PLY_10X5 (CAP, POLYESTER, 10X5.5mm pitch: 7.6mm (Make www.tarahiboard.com))
footprint C_PLY_10X6X9 (CAP, POLYESTER, 10.5X6.0X9.0mm pitch: 7.6mm (Make www.tarahiboard.com))
footprint C_PLY_10X6X12 (CAP, POLYESTER, 10.3X6.0X12.0mm pitch: 7.6mm(Make www.tarahiboard.com))
footprint C_PLY_10X8 (CAP, POLYESTER, 10.0X8.0 pitch: 7.6mm (Make www.tarahiboard.com))
footprint C_PLY_12X4 (CAP, POLYESTER, 12.5X4.5X9.0 pitch: 10mm (Make www.tarahiboard.com))
footprint C_PLY_13X5 (CAP, POLYESTER, 12.8X4.8 pitch: 10mm(Make www.tarahiboard.com))
footprint C_PLY_19X8 (CAP, POLYESTER, 19.0X8.0mm pitch: 15.0mm, 0.22uF 400V (Make www.tarahiboard.com))
footprint C_PLY_22X7 (CAP, POLYESTER, 33.0X7.0mm pitch: 20.0mm, 0.68uF 400V  (Make www.tarahiboard.com))
footprint C_PLY_24X6 (CAP, POLYESTER, 23.8X5.8mm pitch: 20.0mm, 0.33uF 400V (Make www.tarahiboard.com))
footprint C_PLY_26X8 (CAP, POLYESTER, 26.0X7.8mm pitch: 20.0mm, 0.68uF 400V (Make www.tarahiboard.com))
footprint C_PLY_26X9 (CAP, POLYESTER, 26.0X9.3mm pitch: 20.0mm, 0.68uF 400V (Make www.tarahiboard.com))
pins: 1, 2

## Capacitor SMD 0805
designator C?  value 10uf  (hidden comment: Capacitor SMD 0805)
Capacitor C SMD 0805; DatasheetVersion: 2022; ComponentLink1Description: Tarahiboard; ComponentLink1URL: https://www.tarahiboard.com
footprint C0805 (CHIP Capacitor, 2.0X1.3mm, 0805 (Make www.tarahiboard.com))
footprint C0805E (CHIP Capacitor, 2.0X1.3mm, 0805, EXPANDED PAD (Make www.tarahiboard.com))
footprint CAPC2012L (0805) (Chip Capacitor, Body 2.0x1.3mm, IPC High Density (Make www.tarahiboard.com))
footprint CAPC2012M (0805) (Chip Capacitor, Body 2.0x1.3mm, IPC Low Density (Make www.tarahiboard.com))
footprint CAPC2012N (0805) (Chip Capacitor, Body 2.0x1.3mm, IPC Medium Density (Make www.tarahiboard.com))
footprint SMD_CAP_0805 ((Make www.tarahiboard.com))
pins: 1, 2

## Capacitor SMD 0805_1
designator C?, comment value 100nf  (hidden comment: Capacitor SMD 0805)
Capacitor C SMD 0805; DatasheetVersion: 2022; ComponentLink1Description: Tarahiboard; ComponentLink1URL: https://www.tarahiboard.com
footprint C0805 (CHIP Capacitor, 2.0X1.3mm, 0805 (Make www.tarahiboard.com))
footprint C0805E (CHIP Capacitor, 2.0X1.3mm, 0805, EXPANDED PAD (Make www.tarahiboard.com))
footprint CAPC2012L (0805) (Chip Capacitor, Body 2.0x1.3mm, IPC High Density (Make www.tarahiboard.com))
footprint CAPC2012M (0805) (Chip Capacitor, Body 2.0x1.3mm, IPC Low Density (Make www.tarahiboard.com))
footprint CAPC2012N (0805) (Chip Capacitor, Body 2.0x1.3mm, IPC Medium Density (Make www.tarahiboard.com))
footprint SMD_CAP_0805 ((Make www.tarahiboard.com))
pins: 1, 2

## Capacitor SMD 0805_2
designator C?, comment value 20pf  (hidden comment: Capacitor SMD 0805)
Capacitor C SMD 0805; DatasheetVersion: 2022; ComponentLink1Description: Tarahiboard; ComponentLink1URL: https://www.tarahiboard.com
footprint C0805 (CHIP Capacitor, 2.0X1.3mm, 0805 (Make www.tarahiboard.com))
footprint C0805E (CHIP Capacitor, 2.0X1.3mm, 0805, EXPANDED PAD (Make www.tarahiboard.com))
footprint CAPC2012L (0805) (Chip Capacitor, Body 2.0x1.3mm, IPC High Density (Make www.tarahiboard.com))
footprint CAPC2012M (0805) (Chip Capacitor, Body 2.0x1.3mm, IPC Low Density (Make www.tarahiboard.com))
footprint CAPC2012N (0805) (Chip Capacitor, Body 2.0x1.3mm, IPC Medium Density (Make www.tarahiboard.com))
footprint SMD_CAP_0805 ((Make www.tarahiboard.com))
pins: 1, 2

## Capacitor SMD 0805_3
designator C?, comment value 10pf  (hidden comment: Capacitor SMD 0805)
Capacitor C SMD 0805; DatasheetVersion: 2022; ComponentLink1Description: Tarahiboard; ComponentLink1URL: https://www.tarahiboard.com
footprint C0805 (CHIP Capacitor, 2.0X1.3mm, 0805 (Make www.tarahiboard.com))
footprint C0805E (CHIP Capacitor, 2.0X1.3mm, 0805, EXPANDED PAD (Make www.tarahiboard.com))
footprint CAPC2012L (0805) (Chip Capacitor, Body 2.0x1.3mm, IPC High Density (Make www.tarahiboard.com))
footprint CAPC2012M (0805) (Chip Capacitor, Body 2.0x1.3mm, IPC Low Density (Make www.tarahiboard.com))
footprint CAPC2012N (0805) (Chip Capacitor, Body 2.0x1.3mm, IPC Medium Density (Make www.tarahiboard.com))
footprint SMD_CAP_0805 ((Make www.tarahiboard.com))
pins: 1, 2

## Capacitor SMD 0805_4
designator C?, comment value 100nf  (hidden comment: Capacitor SMD 0805)
Capacitor C SMD 0805; DatasheetVersion: 2022; ComponentLink1Description: Tarahiboard; ComponentLink1URL: https://www.tarahiboard.com
footprint C0805 (CHIP Capacitor, 2.0X1.3mm, 0805 (Make www.tarahiboard.com))
footprint C0805E (CHIP Capacitor, 2.0X1.3mm, 0805, EXPANDED PAD (Make www.tarahiboard.com))
footprint CAPC2012L (0805) (Chip Capacitor, Body 2.0x1.3mm, IPC High Density (Make www.tarahiboard.com))
footprint CAPC2012M (0805) (Chip Capacitor, Body 2.0x1.3mm, IPC Low Density (Make www.tarahiboard.com))
footprint CAPC2012N (0805) (Chip Capacitor, Body 2.0x1.3mm, IPC Medium Density (Make www.tarahiboard.com))
footprint SMD_CAP_0805 ((Make www.tarahiboard.com))
pins: 1, 2

## Capacitor SMD 0805_5
designator C?, comment value 1uf  (hidden comment: Capacitor SMD 0805)
Capacitor C SMD 0805; DatasheetVersion: 2022; ComponentLink1Description: Tarahiboard; ComponentLink1URL: https://www.tarahiboard.com
footprint C0805 (CHIP Capacitor, 2.0X1.3mm, 0805 (Make www.tarahiboard.com))
footprint C0805E (CHIP Capacitor, 2.0X1.3mm, 0805, EXPANDED PAD (Make www.tarahiboard.com))
footprint CAPC2012L (0805) (Chip Capacitor, Body 2.0x1.3mm, IPC High Density (Make www.tarahiboard.com))
footprint CAPC2012M (0805) (Chip Capacitor, Body 2.0x1.3mm, IPC Low Density (Make www.tarahiboard.com))
footprint CAPC2012N (0805) (Chip Capacitor, Body 2.0x1.3mm, IPC Medium Density (Make www.tarahiboard.com))
footprint SMD_CAP_0805 ((Make www.tarahiboard.com))
pins: 1, 2

## Capacitor SMD 0805_6
designator C?, comment value 1uf  (hidden comment: Capacitor SMD 0805)
Capacitor C SMD 0805; DatasheetVersion: 2022; ComponentLink1Description: Tarahiboard; ComponentLink1URL: https://www.tarahiboard.com
footprint C0805 (CHIP Capacitor, 2.0X1.3mm, 0805 (Make www.tarahiboard.com))
footprint C0805E (CHIP Capacitor, 2.0X1.3mm, 0805, EXPANDED PAD (Make www.tarahiboard.com))
footprint CAPC2012L (0805) (Chip Capacitor, Body 2.0x1.3mm, IPC High Density (Make www.tarahiboard.com))
footprint CAPC2012M (0805) (Chip Capacitor, Body 2.0x1.3mm, IPC Low Density (Make www.tarahiboard.com))
footprint CAPC2012N (0805) (Chip Capacitor, Body 2.0x1.3mm, IPC Medium Density (Make www.tarahiboard.com))
footprint SMD_CAP_0805 ((Make www.tarahiboard.com))
pins: 1, 2

## Capacitor SMD 0805_7
designator C?, comment value 1nf  (hidden comment: Capacitor SMD 0805)
Capacitor C SMD 0805; DatasheetVersion: 2022; ComponentLink1Description: Tarahiboard; ComponentLink1URL: https://www.tarahiboard.com
footprint C0805 (CHIP Capacitor, 2.0X1.3mm, 0805 (Make www.tarahiboard.com))
footprint C0805E (CHIP Capacitor, 2.0X1.3mm, 0805, EXPANDED PAD (Make www.tarahiboard.com))
footprint CAPC2012L (0805) (Chip Capacitor, Body 2.0x1.3mm, IPC High Density (Make www.tarahiboard.com))
footprint CAPC2012M (0805) (Chip Capacitor, Body 2.0x1.3mm, IPC Low Density (Make www.tarahiboard.com))
footprint CAPC2012N (0805) (Chip Capacitor, Body 2.0x1.3mm, IPC Medium Density (Make www.tarahiboard.com))
footprint SMD_CAP_0805 ((Make www.tarahiboard.com))
pins: 1, 2

## Capacitor SMD 0805_8
designator C?, comment value 10nf  (hidden comment: Capacitor SMD 0805)
Capacitor C SMD 0805; DatasheetVersion: 2022; ComponentLink1Description: Tarahiboard; ComponentLink1URL: https://www.tarahiboard.com
footprint C0805 (CHIP Capacitor, 2.0X1.3mm, 0805 (Make www.tarahiboard.com))
footprint C0805E (CHIP Capacitor, 2.0X1.3mm, 0805, EXPANDED PAD (Make www.tarahiboard.com))
footprint CAPC2012L (0805) (Chip Capacitor, Body 2.0x1.3mm, IPC High Density (Make www.tarahiboard.com))
footprint CAPC2012M (0805) (Chip Capacitor, Body 2.0x1.3mm, IPC Low Density (Make www.tarahiboard.com))
footprint CAPC2012N (0805) (Chip Capacitor, Body 2.0x1.3mm, IPC Medium Density (Make www.tarahiboard.com))
footprint SMD_CAP_0805 ((Make www.tarahiboard.com))
pins: 1, 2

## Capacitor SMD 0805_9
designator C?, comment value 1nf  (hidden comment: Capacitor SMD 0805)
Capacitor C SMD 0805; DatasheetVersion: 2022; ComponentLink1Description: Tarahiboard; ComponentLink1URL: https://www.tarahiboard.com
footprint C0805 (CHIP Capacitor, 2.0X1.3mm, 0805 (Make www.tarahiboard.com))
footprint C0805E (CHIP Capacitor, 2.0X1.3mm, 0805, EXPANDED PAD (Make www.tarahiboard.com))
footprint CAPC2012L (0805) (Chip Capacitor, Body 2.0x1.3mm, IPC High Density (Make www.tarahiboard.com))
footprint CAPC2012M (0805) (Chip Capacitor, Body 2.0x1.3mm, IPC Low Density (Make www.tarahiboard.com))
footprint CAPC2012N (0805) (Chip Capacitor, Body 2.0x1.3mm, IPC Medium Density (Make www.tarahiboard.com))
footprint SMD_CAP_0805 ((Make www.tarahiboard.com))
pins: 1, 2

## Capacitor SMD 0805_10
designator C?, comment value 100pf  (hidden comment: Capacitor SMD 0805)
Capacitor C SMD 0805; DatasheetVersion: 2022; ComponentLink1Description: Tarahiboard; ComponentLink1URL: https://www.tarahiboard.com
footprint C0805 (CHIP Capacitor, 2.0X1.3mm, 0805 (Make www.tarahiboard.com))
footprint C0805E (CHIP Capacitor, 2.0X1.3mm, 0805, EXPANDED PAD (Make www.tarahiboard.com))
footprint CAPC2012L (0805) (Chip Capacitor, Body 2.0x1.3mm, IPC High Density (Make www.tarahiboard.com))
footprint CAPC2012M (0805) (Chip Capacitor, Body 2.0x1.3mm, IPC Low Density (Make www.tarahiboard.com))
footprint CAPC2012N (0805) (Chip Capacitor, Body 2.0x1.3mm, IPC Medium Density (Make www.tarahiboard.com))
footprint SMD_CAP_0805 ((Make www.tarahiboard.com))
pins: 1, 2

## Diode_SS34 SMD
designator D?  value SS34  (hidden comment: Diode_SS34 SMD)
Schottky diode; ComponentLinkp-URL: https://www.smartw.ir/; DatasheetVersion: 2022; ComponentLink1Description: Tarahiboard; ComponentLink1URL: https://www.tarahiboard.com/product/library-pack
footprint Diode_SS34 ((Make www.tarahiboard.com))
pins: 1 A, 2 K

## DP83848CVV
designator U?
footprint TQFP48_M (48-Pin Thin Quad Flat Pack 0.5 mm Pitch, IPC Low Density)
pins: 1 TX_CLK (out), 2 TX_EN (in), 3 TXD_0 (in), 4 TXD_1 (in), 5 TXD_2 (in), 6 TXD_3/SNI_MODE (in), 7 PWR_DOWN/INT, 8 NC, 9 NC, 10 NC, 11 NC, 12 NC, 13 RD-, 14 RD+, 15 AGND, 16 TD-, 17 TD+, 18 PFBIN1, 19 AGND, 20 NC, 21 NC, 22 AVDD33, 23 PFBOUT, 24 RBIAS, 25 25MHz_OUT (out), 26 LED_ACT/COL/AN_EN, 27 LED_SPEED/AN1, 28 LED_LINK/AN0, 29 RESET_N, 30 MDIO (io), 31 MDC (in), 32 IOVDD33, 33 X2 (out), 34 X1 (in), 35 IOGND, 36 DGND, 37 PFBIN2, 38 RX_CLK (out), 39 RX_DV/MII_MODE (out), 40 CRS/CRS_DV/LED_CFG (out), 41 RX_ER/MDIX_EN (out), 42 COL/PHYAD0 (out), 43 RXD_0/PHYAD1 (out), 44 RXD_1/PHYAD2 (out), 45 RXD_2/PHYAD3 (out), 46 RXD_3/PHYAD4 (out), 47 IOGND, 48 IOVDD33

## ECS-200-S-4_20.0_MHZ
designator Y?, comment 25MHz
MP: ECS-200-S-4_20.0_MHZ; Package: None; Price: None; Value: *; Availability: Unavailable
footprint XTAL_ECS-200-S-4_20.0_MHZ
pins: 1, 2

## Fuse 5x20 with holdeer pins
designator F?, comment F=3.6 A
Fuses 5x20
footprint Fuse 5x20 With holder pin
pins: 1, 2

## Inductor SMD NC 1206
designator L?  value 1uH  (hidden comment: Inductor SMD NC 1206)
DatasheetVersion: 2022; ComponentLink1Description: Tarahiboard; ComponentLink1URL: https://www.tarahiboard.com/product/library-pack
footprint L1206 (1206, 3.2*1.6mm (Make www.tarahiboard.com))
footprint L1206E (1206, (Make www.tarahiboard.com))
pins: 1, 2

## IRF3205PBF
designator Q?, comment 6N60
N-Channel 55V 110A _Tc_ 200W _Tc_ Through Hole TO-220AB; MP: IRF3205PBF; MF: Infineon Technologies; Package: TO-220 International Rectifier; Value: *; Availability: Unavailable; Price: None; SnapEDA_Link: https://www.snapeda.com/parts/IRF3205PBF/Infineon%20Technologies/view-part/98571/?ref=snap
footprint TO254P1067X483X3124-3P
pins: 1 G, 2 D, 3 S

## IRF4905
designator Q?
OptiMOS - P2 Power-Transistor, P-channel-Enhancement mode, VDS -30V; Manufacturer: Infineon Technologies; Manufacturer Order NumberManufacturer Order Number: IRF4905; PackageReference: PG-TO220-3-904
footprint IRF4905PBF (TO,flange mount,2.54 mm pitch, 3 pin, 10.16 mm L X 4.57 mm W X 20.56 mm H body)
pins: 1 GATE, 2 DRAIN, 3 SOURCE